# Altium footprint library chipfc_libs.PCBLIB: 315 footprints (part 1 of 20)
Each footprint in its own frame and in the unit in brackets; x right, y up, seen from the top. Pads: shape width x height; smd on the part's side, far side on the other; paste and mask are expansions set on the pad; w line width, h text height; cw(c..) or ccw(c..) is an arc to the next point about the centre after c.
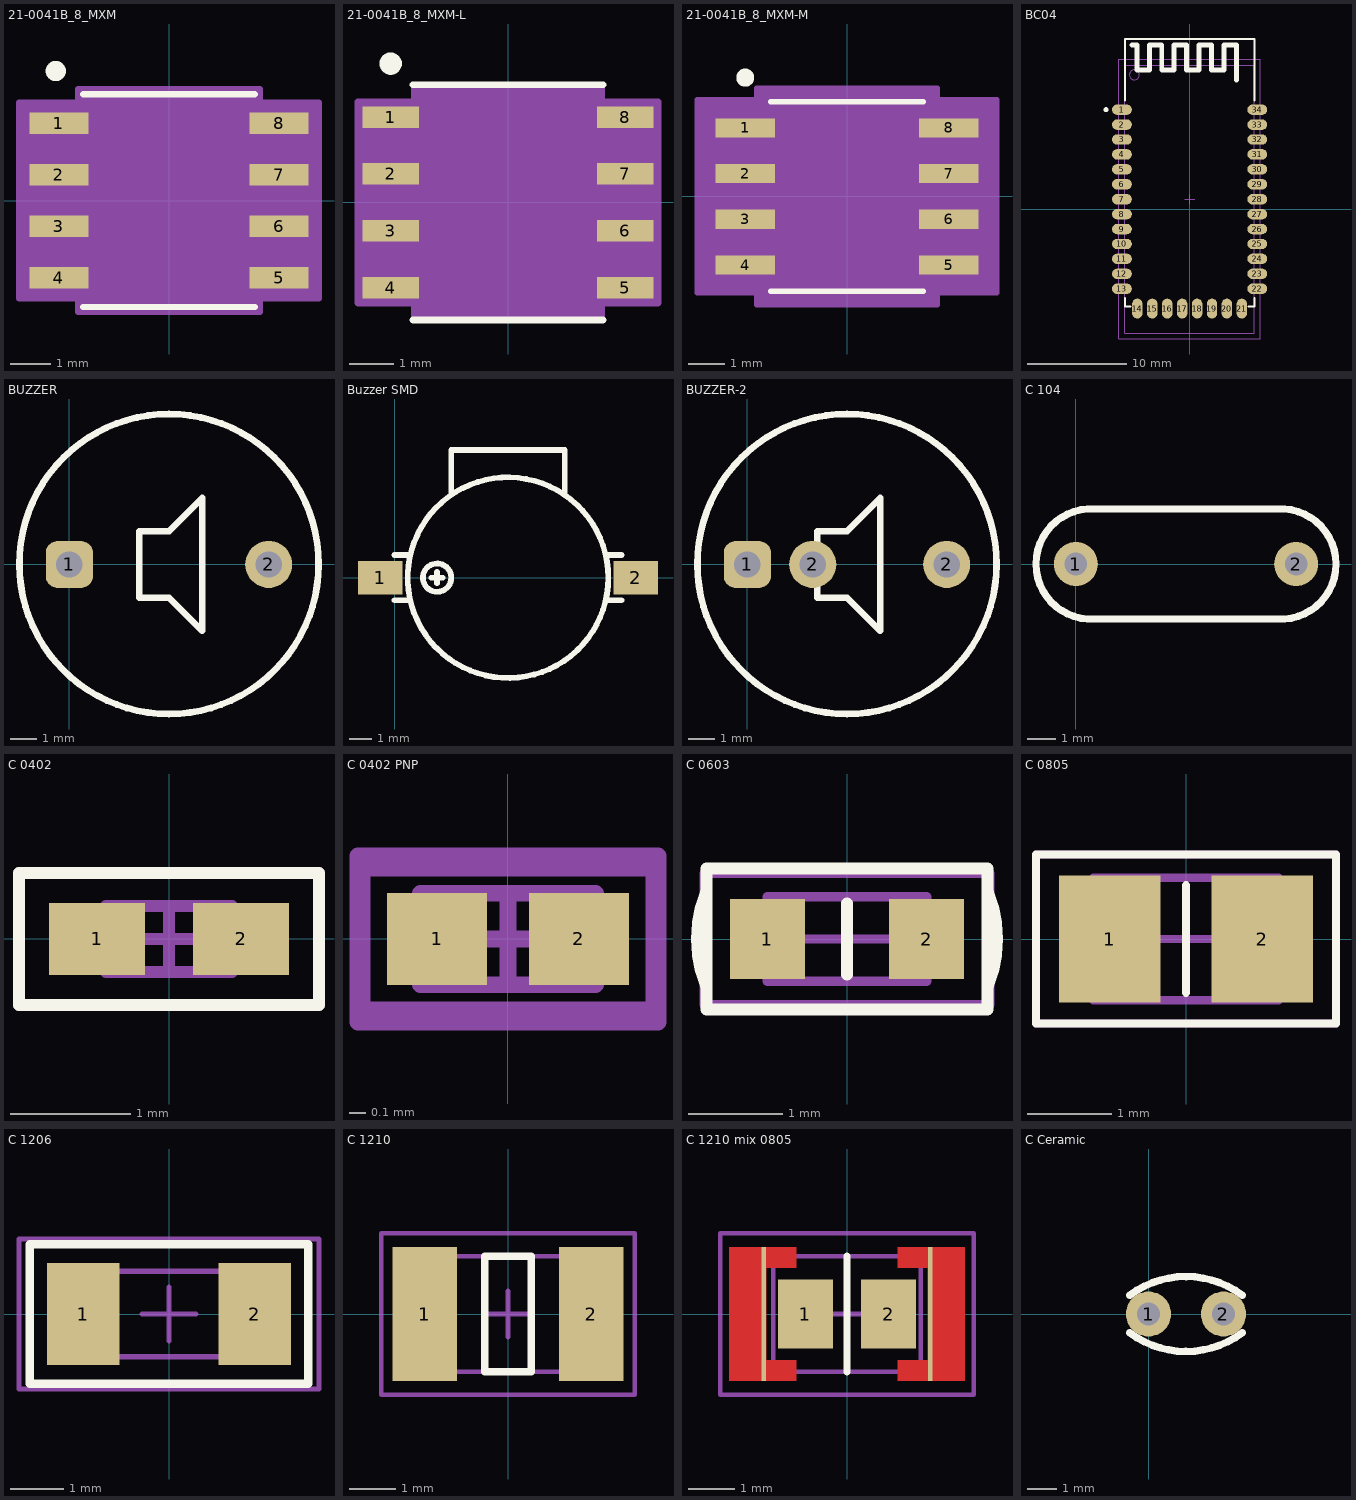
[diagram p0: the footprints below, top view; thin cyan lines are the x and y axes]

## 21-0041B_8_MXM [mil]
pads (8):
  rect 57.5x21 smd: 1(-107.25,75) 2(-107.25,25) 3(-107.25,-25) 4(-107.25,-75) 5(107.25,-75) 6(107.25,-25) 7(107.25,25) 8(107.25,75)
Top Overlay:
  circle w9.84: c-110.24,125.98 r4.92
  lines w6: -83.5,-103.5 83.5,-103.5 ; -83.5,103.5 83.5,103.5
Mechanical 13:
  lines w0: -12,98.5 ccw(c0,98.5) 12,98.5
  lines w1: -122,-84.5 -78.5,-84.5 -78.5,-65.5 -122,-65.5 -122,-84.5 ; -122,-34.5 -78.5,-34.5 -78.5,-15.5 -122,-15.5 -122,-34.5 ; -122,15.5 -78.5,15.5 -78.5,34.5 -122,34.5 -122,15.5 ; -122,65.5 -78.5,65.5 -78.5,84.5 -122,84.5 -122,65.5 ; -78.5,-98.5 -78.5,98.5 78.5,98.5 78.5,-98.5 -78.5,-98.5 ; 78.5,-84.5 122,-84.5 122,-65.5 78.5,-65.5 78.5,-84.5 ; 78.5,-34.5 122,-34.5 122,-15.5 78.5,-15.5 78.5,-34.5 ; 78.5,15.5 122,15.5 122,34.5 78.5,34.5 78.5,15.5 ; 78.5,65.5 122,65.5 122,84.5 78.5,84.5 78.5,65.5
  text "*" at -76,45.5 h50
Mechanical 15:
  region: -88.5,-95.5 -146,-95.5 -146,95.5 -88.5,95.5 -88.5,108.5 88.5,108.5 88.5,95.5 146,95.5 146,-95.5 88.5,-95.5 88.5,-108.5 -88.5,-108.5
  lines w6: -146,-95.5 -88.5,-95.5 -88.5,-108.5 88.5,-108.5 88.5,-95.5 146,-95.5 146,95.5 88.5,95.5 88.5,108.5 -88.5,108.5 -88.5,95.5 -146,95.5 -146,-95.5
3D body "21-0041B_8_MXM.step": height 69.09, standoff 0, extent -122.01,-98.5 122.01,98.5

## 21-0041B_8_MXM-L [mil]
pads (8):
  rect 49.5x19 smd: 1(-103.25,75) 2(-103.25,25) 3(-103.25,-25) 4(-103.25,-75) 5(103.25,-75) 6(103.25,-25) 7(103.25,25) 8(103.25,75)
Top Overlay:
  circle w9.84: c-103.25,122.05 r4.92
  lines w6: -83.5,-103.5 83.5,-103.5 ; -83.5,103.5 83.5,103.5
Mechanical 13:
  lines w0: -12,98.5 ccw(c0,98.5) 12,98.5
  lines w1: -122,-84.5 -78.5,-84.5 -78.5,-65.5 -122,-65.5 -122,-84.5 ; -122,-34.5 -78.5,-34.5 -78.5,-15.5 -122,-15.5 -122,-34.5 ; -122,15.5 -78.5,15.5 -78.5,34.5 -122,34.5 -122,15.5 ; -122,65.5 -78.5,65.5 -78.5,84.5 -122,84.5 -122,65.5 ; -78.5,-98.5 -78.5,98.5 78.5,98.5 78.5,-98.5 -78.5,-98.5 ; 78.5,-84.5 122,-84.5 122,-65.5 78.5,-65.5 78.5,-84.5 ; 78.5,-34.5 122,-34.5 122,-15.5 78.5,-15.5 78.5,-34.5 ; 78.5,15.5 122,15.5 122,34.5 78.5,34.5 78.5,15.5 ; 78.5,65.5 122,65.5 122,84.5 78.5,84.5 78.5,65.5
  text "*" at -76,45.5 h50
Mechanical 15:
  region: -82.5,-88.5 -132,-88.5 -132,88.5 -82.5,88.5 -82.5,102.5 82.5,102.5 82.5,88.5 132,88.5 132,-88.5 82.5,-88.5 82.5,-102.5 -82.5,-102.5
  lines w6: -132,-88.5 -82.5,-88.5 -82.5,-102.5 82.5,-102.5 82.5,-88.5 132,-88.5 132,88.5 82.5,88.5 82.5,102.5 -82.5,102.5 -82.5,88.5 -132,88.5 -132,-88.5
3D body "21-0041B_8_MXM.step": height 69.09, standoff 0, extent -122.01,-98.5 122.01,98.5

## 21-0041B_8_MXM-M [mil]
pads (8):
  rect 65.5x21 smd: 1(-111.25,75) 2(-111.25,25) 3(-111.25,-25) 4(-111.25,-75) 5(111.25,-75) 6(111.25,-25) 7(111.25,25) 8(111.25,75)
Top Overlay:
  circle w9.84: c-111.25,129.92 r4.92
  lines w6: -83.5,-103.5 83.5,-103.5 ; -83.5,103.5 83.5,103.5
Mechanical 13:
  lines w0: -12,98.5 ccw(c0,98.5) 12,98.5
  lines w1: -122,-84.5 -78.5,-84.5 -78.5,-65.5 -122,-65.5 -122,-84.5 ; -122,-34.5 -78.5,-34.5 -78.5,-15.5 -122,-15.5 -122,-34.5 ; -122,15.5 -78.5,15.5 -78.5,34.5 -122,34.5 -122,15.5 ; -122,65.5 -78.5,65.5 -78.5,84.5 -122,84.5 -122,65.5 ; -78.5,-98.5 -78.5,98.5 78.5,98.5 78.5,-98.5 -78.5,-98.5 ; 78.5,-84.5 122,-84.5 122,-65.5 78.5,-65.5 78.5,-84.5 ; 78.5,-34.5 122,-34.5 122,-15.5 78.5,-15.5 78.5,-34.5 ; 78.5,15.5 122,15.5 122,34.5 78.5,34.5 78.5,15.5 ; 78.5,65.5 122,65.5 122,84.5 78.5,84.5 78.5,65.5
  text "*" at -76,45.5 h50
Mechanical 15:
  region: -98.5,-105.5 -164,-105.5 -164,105.5 -98.5,105.5 -98.5,118.5 98.5,118.5 98.5,105.5 164,105.5 164,-105.5 98.5,-105.5 98.5,-118.5 -98.5,-118.5
  lines w6: -164,-105.5 -98.5,-105.5 -98.5,-118.5 98.5,-118.5 98.5,-105.5 164,-105.5 164,105.5 98.5,105.5 98.5,118.5 -98.5,118.5 -98.5,105.5 -164,105.5 -164,-105.5
3D body "21-0041B_8_MXM.step": height 69.09, standoff 0, extent -122.01,-98.5 122.01,98.5

## BC04 [mm] "Bluetooth module uses CSR BlueCore4-External chipsets."
height 2.2
pads (34):
  oval 2x1.05 smd: 1(-6.8,10) 2(-6.8,8.5) 3(-6.8,7) 4(-6.8,5.5) 5(-6.8,4) 6(-6.8,2.5) 7(-6.8,1) 8(-6.8,-0.5) 9(-6.8,-2) 10(-6.8,-3.5) 11(-6.8,-5) 12(-6.8,-6.5) 13(-6.8,-8) 22(6.8,-8) 23(6.8,-6.5) 24(6.8,-5) 25(6.8,-3.5) 26(6.8,-2) 27(6.8,-0.5) 28(6.8,1) 29(6.8,2.5) 30(6.8,4) 31(6.8,5.5) 32(6.8,7) 33(6.8,8.5) 34(6.8,10)
  oval 1.05x2 smd: 14(-5.25,-10) 15(-3.75,-10) 16(-2.25,-10) 17(-0.75,-10) 18(0.75,-10) 19(2.25,-10) 20(3.75,-10) 21(5.25,-10)
Top Overlay:
  circle w0.25: c-8.4,10 r0.125
  lines w0.2: -6.5,-8.925 -6.5,-9.79 -5.925,-9.79 ; -6.5,10.925 -6.5,17.1 6.5,17.1 6.5,10.925 ; 5.925,-9.79 6.5,-9.79 6.5,-8.925
  lines w0.5: -5.8,16.5 -5.3,16.5 -5.3,14 -4.05,14 -4.05,16.5 -2.8,16.5 -2.8,14 -1.55,14 -1.55,16.5 -0.3,16.5 -0.3,14 0.95,14 0.95,16.5 2.2,16.5 2.2,14 3.45,14 3.45,16.5 4.7,16.5 4.7,13
Mechanical 13:
  circle w0.1: c-5.55,13.5 r0.5
  lines w0.1: -6.5,-12.45 6.5,-12.45 6.5,14.45 -6.5,14.45 -6.5,-12.45
Mechanical 15:
  lines w0.1: -0.5,1 0.5,1 ; 0,0.5 0,1.5 ; -7.1,-13.05 7.1,-13.05 7.1,15.05 -7.1,15.05 -7.1,-13.05
3D body "User Library-Module Bluetooth.step": height 2.4, standoff -0.04, extent -6.501,-9.951 6.501,16.95

## BUZZER [mm] "DC Buzzer 5V/12V"
pads (2):
  rrect50% 1.8x1.8 hole 1: 1(0,0)
  round 1.8 hole 1: 2(7.62,0)
Top Overlay:
  lines w0.254: -1.905,0 ccw(c3.81,0) 9.525,0 ccw(c3.81,0.035) -1.905,0 ; 2.667,-1.27 2.667,-0.127 2.667,1.27 3.81,1.27 5.08,2.54 5.08,-2.54 3.81,-1.27 2.667,-1.27
3D body "User Library-WST-1203UX.step": height 9.65, standoff -4.5, extent -5.644,-6 9.81,6

## Buzzer SMD [mm] "SMD DC Buzzer 5V"
pads (2):
  rect 2x1.5 smd: 1(-0.635,0) 2(10.795,0)
Top Overlay:
  circle w0.254: c1.905,0 r0.635
  circle w0.254: c5.08,0 r4.49
  lines w0.254: 0,-1.016 0.635,-1.016 ; 0,1.016 0.635,1.016 ; 1.651,0 2.159,0 ; 1.905,-0.254 1.905,0.254 ; 2.54,3.81 2.54,5.715 7.62,5.715 7.62,3.81 ; 9.525,-1.016 10.16,-1.016 ; 9.525,1.016 10.16,1.016
3D body "CircuitWorks-BUZZER (SPEAKER) SMD.step": height 4, standoff -0.02, extent -1.07,-4.575 11.23,5.575

## BUZZER-2 [mm] "DC Buzzer 5V/12V"
pads (3):
  rrect50% 1.8x1.8 hole 1: 1(0,0)
  round 1.8 hole 1: 2(2.5,0) 2(7.62,0)
Top Overlay:
  lines w0.254: -1.905,0 ccw(c3.81,0) 9.525,0 ccw(c3.81,0.035) -1.905,0 ; 2.667,-1.27 2.667,-0.127 2.667,1.27 3.81,1.27 5.08,2.54 5.08,-2.54 3.81,-1.27 2.667,-1.27
3D body "User Library-WST-1203UX.step": height 9.65, standoff -4.5, extent -5.644,-6 9.81,6

## C 104 [mil] "Capacitor"
pads (2):
  round 60 hole 31: 1(0,0) 2(300,0)
Top Overlay:
  lines w10: 25,-75 cw(c20.83,0) 25,75 275,75 cw(c279.17,0) 275,-75 25,-75

## C 0402 [mm] "Chip Capacitor, 2-Leads, Body 1.0x0.5mm, IPC Medium Density"
height 0.55
pads (2):
  rect 0.8x0.6 smd: 1(-0.6,0) 2(0.6,0)
Top Overlay:
  lines w0.1: -1.25,-0.55 1.25,-0.55 1.25,0.55 -1.25,0.55 -1.25,-0.55
Mechanical 13:
  lines w0.1: -0.525,-0.275 0.525,-0.275 0.525,0.275 -0.525,0.275 -0.525,-0.275
Mechanical 15:
  lines w0.1: -0.275,0 0.275,0 ; 0,-0.275 0,0.275 ; -1.25,-0.55 1.25,-0.55 1.25,0.55 -1.25,0.55 -1.25,-0.55
3D body "User Library-CAPC1005X06.step": height 0.6, standoff 0, extent -0.5,-0.25 0.5,0.25

## C 0402 PNP [mm] "Chip Capacitor, 2-Leads, Body 1.0x0.5mm, IPC Medium Density"
height 0.55
pads (2):
  rect 0.6x0.55 smd: 1(-0.425,0) 2(0.425,0)
Mechanical 13:
  lines w0.1: -0.525,-0.275 0.525,-0.275 0.525,0.275 -0.525,0.275 -0.525,-0.275
Mechanical 15:
  lines w0.1: -0.275,0 0.275,0 ; 0,-0.275 0,0.275 ; -0.875,-0.425 0.875,-0.425 0.875,0.425 -0.875,0.425 -0.875,-0.425
Mechanical 31:
  lines w0.1: -0.9,-0.5 0.9,-0.5 0.9,0.5 -0.9,0.5 -0.9,-0.5
3D body "User Library-CAPC1005X06.step": height 0.6, standoff 0, extent -0.5,-0.25 0.5,0.25

## C 0603 [mm] "Chip Capacitor, 2-Leads, Body 1.6x0.8mm, IPC Medium Density"
height 0.8
pads (2):
  rect 0.8x0.85 smd: 1(-0.85,0) 2(0.85,0)
Top Overlay:
  lines w0.127: -1.503,-0.501 cw(c-0.25,0) -1.503,0.501 ; 0,-0.381 0,0.381 ; 1.503,-0.501 ccw(c0.25,0) 1.503,0.501 ; -1.5,-0.75 -1.5,0.75 1.5,0.75 1.5,-0.75 -1.5,-0.75
Mechanical 13:
  lines w0.1: -0.85,-0.45 -0.85,0.45 0.85,0.45 0.85,-0.45 -0.85,-0.45
Mechanical 15:
  lines w0.1: -0.45,0 0.45,0 ; 0,-0.45 0,0.45 ; -1.525,-0.7 -1.525,0.7 1.525,0.7 1.525,-0.7 -1.525,-0.7
3D body "User Library-Chip Capacitor2.step": height 0.81, standoff 0.01, extent -0.8,-0.432 0.8,0.428

## C 0805 [mm] "Chip Capacitor, 2-Leads, Body 2.0x1.3mm, IPC Medium Density"
height 0.85
pads (2):
  rect 1.2x1.5 smd: 1(-0.9,0) 2(0.9,0)
Top Overlay:
  lines w0.1: 0,-0.635 0,0.635 ; -1.775,-1 -1.775,1 1.775,1 1.775,-1 -1.775,-1
Mechanical 13:
  lines w0.1: -1.1,-0.725 -1.1,0.725 1.1,0.725 1.1,-0.725 -1.1,-0.725
Mechanical 15:
  lines w0.1: -0.5,0 0.5,0 ; 0,-0.5 0,0.5 ; -1.775,-1 1.775,-1 1.775,1 -1.775,1 -1.775,-1
3D body "cap 0805.step": height 0.6, standoff 0, extent -1,-0.64 1,0.61

## C 1206 [mm]
height 0.85
pads (2):
  rect 1.35x1.9 smd: 1(-1.6,0) 2(1.6,0)
Top Overlay:
  lines w0.16: -2.6,-1.3 2.6,-1.3 2.6,1.3 -2.6,1.3 -2.6,-1.3
Mechanical 13:
  lines w0.1: -1.6,-0.8 1.6,-0.8 1.6,0.8 -1.6,0.8 -1.6,-0.8
Mechanical 15:
  lines w0.1: -0.5,0 0.5,0 ; 0,-0.5 0,0.5 ; -2.8,-1.4 -2.8,1.4 2.8,1.4 2.8,-1.4 -2.8,-1.4
3D body "User Library-CR3216-1206.step": height 0.6, standoff 0, extent -1.6,-0.8 1.6,0.8

## C 1210 [mm]
height 0.85
pads (2):
  rect 1.4x2.9 smd: 1(-1.8,0) 2(1.8,0)
Top Overlay:
  lines w0.16: -0.5,-1.25 -0.5,1.25 0.5,1.25 0.5,-1.25 -0.5,-1.25
Mechanical 13:
  lines w0.1: -1.6,-1.25 -1.6,1.25 1.6,1.25 1.6,-1.25 -1.6,-1.25
Mechanical 15:
  lines w0.1: -0.5,0 0.5,0 ; 0,-0.5 0,0.5 ; -2.75,-1.75 2.75,-1.75 2.75,1.75 -2.75,1.75 -2.75,-1.75
3D body "User Library-SMD CAPACITOR.step": height 0.79, standoff 0.01, extent -1.6,-1.25 1.6,1.25

## C 1210 mix 0805 [mm]
height 0.85
pads (4):
  rect 0.1x2.9 smd: 1(-1.8,0) 2(1.8,0)
  rect 1.2x1.5 smd: 1(-0.9,0) 2(0.9,0)
Top Layer:
  region: 1.1,1.45 2.55,1.45 2.55,-1.45 1.1,-1.45 1.1,-1 1.75,-1 1.75,1 1.1,1
  region: -1.1,1.45 -2.55,1.45 -2.55,-1.45 -1.1,-1.45 -1.1,-1 -1.75,-1 -1.75,1 -1.1,1
Top Overlay:
  lines w0.16: 0,-1.25 0,1.25 0,-1.25
Top Solder:
  region: 1,-0.9 1,-1.55 2.65,-1.55 2.65,1.55 1,1.55 1,0.9 1.65,0.9 1.65,-0.9
  region: -1,-0.9 -1,-1.55 -2.65,-1.55 -2.65,1.55 -1,1.55 -1,0.9 -1.65,0.9 -1.65,-0.9
Mechanical 13:
  lines w0.1: -1.6,-1.25 1.6,-1.25 1.6,1.25 -1.6,1.25 -1.6,-1.25
Mechanical 15:
  lines w0.1: -0.5,0 0.5,0 ; 0,-0.5 0,0.5 ; -2.75,-1.75 -2.75,1.75 2.75,1.75 2.75,-1.75 -2.75,-1.75
3D body "User Library-SMD CAPACITOR.step": height 0.79, standoff 0.01, extent -1.6,-1.25 1.6,1.25

## C Ceramic [mil]
pads (2):
  round 60 hole 31: 1(0,0) 2(100,0)
Top Overlay:
  lines w10: -25,-25 ccw(c50,75) 125,-25 ; -25,25 cw(c50,-75) 125,25